# Altium schematic symbol library HFJ11-1G01E-L12RL.SchLib: 1 symbol
Pins are listed as number, name and electrical type; pins without a type are passive.

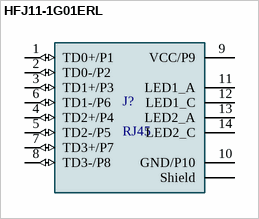
[diagram p0: symbol HFJ11-1G01ERL]

## HFJ11-1G01ERL
designator J?, comment RJ45
FastJack Single Port RJ45 Right Angle Gigabit Ethernet Modular Jack; MP: HFJ11-1G01ERL; MF: Halo; SnapEDA_Link: https://www.snapeda.com/parts/HFJ11-1G01ERL/Halo/view-part/231013/?ref=snap; Availability: Unavailable; Price: None; Value: *; Package: None
footprint HFJ11-1G01ERL
pins: 1 TD0+/P1 (io), 2 TD0-/P2 (io), 3 TD1+/P3 (io), 4 TD2+/P4 (io), 5 TD2-/P5 (io), 6 TD1-/P6 (io), 7 TD3+/P7 (io), 8 TD3-/P8 (io), 9 VCC/P9 (power), 10 GND/P10 (power), 11 LED1_A, 12 LED1_C, 13 LED2_A, 14 LED2_C, Shield (power)